# Altium footprint library Copy of ASCIIPCB2.PcbLib: 22 footprints (part 2 of 2)
Each footprint in its own frame and in the unit in brackets; x right, y up, seen from the top. Pads: shape width x height; smd on the part's side, far side on the other; paste and mask are expansions set on the pad; w line width, h text height; cw(c..) or ccw(c..) is an arc to the next point about the centre after c.
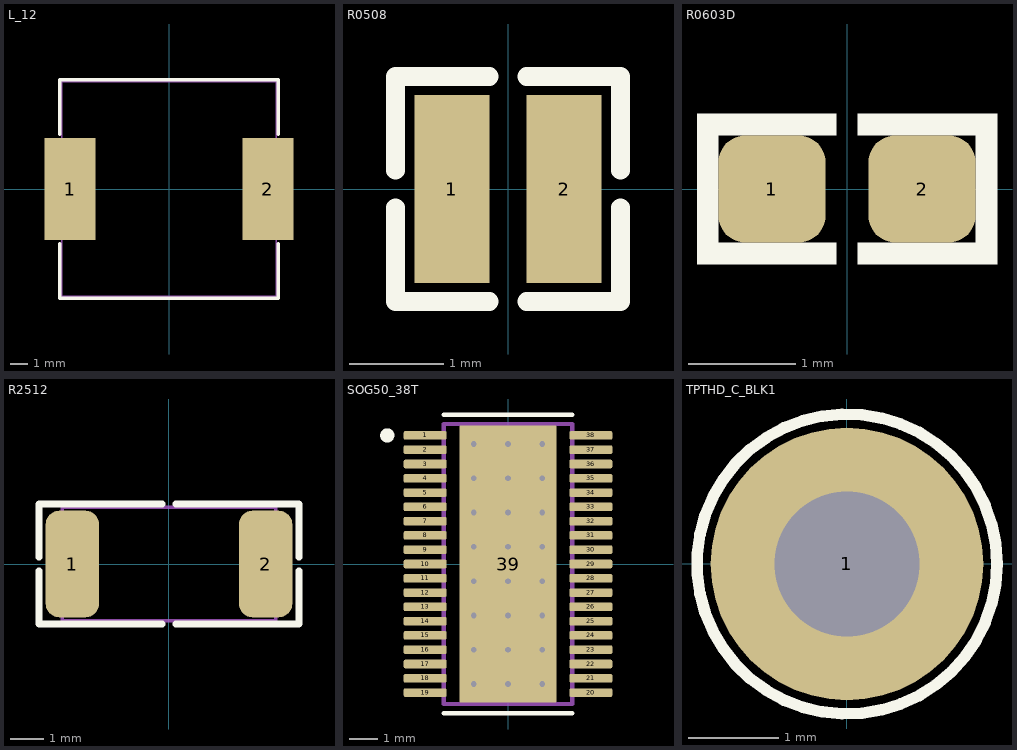
[diagram p1: the footprints below, top view; thin cyan lines are the x and y axes]

## L_12 [mm]
pads (2):
  rect 3x6 smd paste-4: 1(-5.8,0) 2(5.8,0)
Top Overlay:
  lines w0.2: -6.4,-3.2 -6.4,-6.4 6.4,-6.4 6.4,-3.2 ; -6.4,3.2 -6.4,6.4 6.4,6.4 6.4,3.2
Top Paste:
  rectangle: -6.9,-2.7 -4.5,-0.2
  rectangle: -6.9,0.2 -4.5,2.7
  region: 6.9,2.7 4.5,2.7 4.5,0.2 6.9,0.2
  region: 6.9,-0.2 4.5,-0.2 4.5,-2.7 6.9,-2.7
Mechanical 13:
  lines w0.1: -6.3,-6.3 6.3,-6.3 6.3,6.3 -6.3,6.3 -6.3,-6.3
3D body "User Library-D128C.step": height 8.16, standoff 0, extent -6.158,-6.15 6.158,6.15

## R0508 [mm]
pads (2):
  rect 0.8x2 smd: 1(-0.6,0) 2(0.6,0)
Top Overlay:
  lines w0.2: -1.2,-0.2 -1.2,-1.2 -0.2,-1.2 ; -1.2,0.2 -1.2,1.2 -0.2,1.2 ; 0.2,-1.2 1.2,-1.2 1.2,-0.2 ; 0.2,1.2 1.2,1.2 1.2,0.2
3D body "User Library-RESC1220X07N.STEP": height 0.7, standoff 0, extent -0.675,-1.05 0.675,1.05

## R0603D [mm]
pads (2):
  rrect50% 1x1 smd paste-0.5 mask-0.1: 1(-0.7,0) 2(0.7,0)
Top Overlay:
  region: 0.1,-0.5 0.1,-0.7 1.4,-0.7 1.4,-0.5
  region: 0.1,0.5 0.1,0.7 1.4,0.7 1.4,0.5
  region: 1.4,0.7 1.2,0.7 1.2,-0.7 1.4,-0.7
  region: -1.4,0.7 -1.2,0.7 -1.2,-0.7 -1.4,-0.7
  region: -0.1,0.5 -0.1,0.7 -1.4,0.7 -1.4,0.5
  region: -0.1,-0.5 -0.1,-0.7 -1.4,-0.7 -1.4,-0.5
Top Paste:
  region: -0.4,-0.05 -0.4,0.05 -0.4,0.12 -0.453,0.248 -0.552,0.347 -0.68,0.4 -0.75,0.4 -0.85,0.4 -0.9,0.4 -0.992,0.362 -1.062,0.292 -1.1,0.2 -1.1,0.15 -1.1,-0.15 -1.1,-0.2 -1.062,-0.292 -0.992,-0.362 -0.9,-0.4 -0.85,-0.4 -0.75,-0.4 -0.68,-0.4 -0.552,-0.347 -0.453,-0.248 -0.4,-0.12
  region: 0.4,-0.05 0.4,0.05 0.4,0.12 0.453,0.248 0.552,0.347 0.68,0.4 0.75,0.4 0.85,0.4 0.9,0.4 0.992,0.362 1.062,0.292 1.1,0.2 1.1,0.15 1.1,-0.15 1.1,-0.2 1.062,-0.292 0.992,-0.362 0.9,-0.4 0.85,-0.4 0.75,-0.4 0.68,-0.4 0.552,-0.347 0.453,-0.248 0.4,-0.12
3D body "User Library-RES_1609-0603.step": height 0.56, standoff 0, extent -0.85,-0.4 0.85,0.4

## R2512 [mm]
pads (2):
  rrect50% 1.6x3.2 smd: 1(-2.9,0) 2(2.9,0)
Top Overlay:
  lines w0.2: -3.9,-0.2 -3.9,-1.8 -0.2,-1.8 ; -3.9,0.2 -3.9,1.8 -0.2,1.8 ; 0.2,-1.8 3.9,-1.8 3.9,-0.2 ; 0.2,1.8 3.9,1.8 3.9,0.2
Mechanical 13:
  lines w0.1: -3.2,-1.7 3.2,-1.7 3.2,1.7 -3.2,1.7 -3.2,-1.7
3D body "User Library-2512 SMD Resistor.step": height 1.6, standoff 0, extent -3.175,-1.5 3.175,1.5

## SOG50_38T [mm]
pads (39):
  rrect33% 1.5x0.3 smd paste+0 mask+0: 1(-2.9,4.5) 2(-2.9,4) 3(-2.9,3.5) 4(-2.9,3) 5(-2.9,2.5) 6(-2.9,2) 7(-2.9,1.5) 8(-2.9,1) 9(-2.9,0.5) 10(-2.9,0) 11(-2.9,-0.5) 12(-2.9,-1) 13(-2.9,-1.5) 14(-2.9,-2) 15(-2.9,-2.5) 16(-2.9,-3) 17(-2.9,-3.5) 18(-2.9,-4) 19(-2.9,-4.5) 20(2.9,-4.5) 21(2.9,-4) 22(2.9,-3.5) 23(2.9,-3) 24(2.9,-2.5) 25(2.9,-2) 26(2.9,-1.5) 27(2.9,-1) 28(2.9,-0.5) 29(2.9,0) 30(2.9,0.5) 31(2.9,1) 32(2.9,1.5) 33(2.9,2) 34(2.9,2.5) 35(2.9,3) 36(2.9,3.5) 37(2.9,4) 38(2.9,4.5)
  rrect3% 3.4x9.7 smd paste-1000 mask-1000: 39(0,0)
via 0,-4.2 diameter 0.5 hole 0.2
via 0,-3 diameter 0.5 hole 0.2
via 0,-1.8 diameter 0.5 hole 0.2
via 0,-0.6 diameter 0.5 hole 0.2
via 0,0.6 diameter 0.5 hole 0.2
via 0,1.8 diameter 0.5 hole 0.2
via 0,3 diameter 0.5 hole 0.2
via 0,4.2 diameter 0.5 hole 0.2
via 1.2,-4.2 diameter 0.5 hole 0.2
via 1.2,-3 diameter 0.5 hole 0.2
via 1.2,-1.8 diameter 0.5 hole 0.2
via 1.2,-0.6 diameter 0.5 hole 0.2
via 1.2,0.6 diameter 0.5 hole 0.2
via 1.2,1.8 diameter 0.5 hole 0.2
via 1.2,3 diameter 0.5 hole 0.2
via 1.2,4.2 diameter 0.5 hole 0.2
via -1.2,-4.2 diameter 0.5 hole 0.2
via -1.2,-3 diameter 0.5 hole 0.2
via -1.2,-1.8 diameter 0.5 hole 0.2
via -1.2,-0.6 diameter 0.5 hole 0.2
via -1.2,0.6 diameter 0.5 hole 0.2
via -1.2,1.8 diameter 0.5 hole 0.2
via -1.2,3 diameter 0.5 hole 0.2
via -1.2,4.2 diameter 0.5 hole 0.2
Top Overlay:
  circle w0.25: c-4.225,4.5 r0.125
  lines w0.15: -2.25,-5.225 2.25,-5.225 ; -2.25,5.225 2.25,5.225
Top Paste:
  region: 1.45,2.3 1.45,-2.3 1.45,-2.31 1.442,-2.328 1.428,-2.342 1.41,-2.35 1.4,-2.35 -1.4,-2.35 -1.41,-2.35 -1.428,-2.342 -1.442,-2.328 -1.45,-2.31 -1.45,-2.3 -1.45,2.3 -1.45,2.31 -1.442,2.328 -1.428,2.342 -1.41,2.35 -1.4,2.35 1.4,2.35 1.41,2.35 1.428,2.342 1.442,2.328 1.45,2.31
Top Solder:
  region: 1.45,2.3 1.45,-2.3 1.45,-2.31 1.442,-2.328 1.428,-2.342 1.41,-2.35 1.4,-2.35 -1.4,-2.35 -1.41,-2.35 -1.428,-2.342 -1.442,-2.328 -1.45,-2.31 -1.45,-2.3 -1.45,2.3 -1.45,2.31 -1.442,2.328 -1.428,2.342 -1.41,2.35 -1.4,2.35 1.4,2.35 1.41,2.35 1.428,2.342 1.442,2.328 1.45,2.31
Mechanical 13:
  lines w0.15: -2.25,-4.9 2.25,-4.9 2.25,4.9 -2.25,4.9 -2.25,-4.9
3D body: height 0.25, standoff 0, extent -3.75,-5.15 3.75,5.15

## TPTHD_C_BLK1 [mm]
pads (1):
  round 3 hole 1.6: 1(0,0)
Top Overlay:
  circle w0.127: c0,0 r1.651
Mechanical 13:
  circle w0.076: c0,0 r0.76
3D body "TestPoint_Multi.stp": height 8.09, standoff -3.21, extent -1.597,-1.6 1.597,1.587